# Altium schematic symbol library SMBJ14A-13-F.SchLib: 1 symbol
Pins are listed as number, name and electrical type; pins without a type are passive.

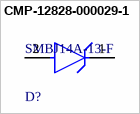
[diagram p0: symbol CMP-12828-000029-1]

## CMP-12828-000029-1
designator D?, comment SMBJ14A-13-F
TVS DIODE 14V 23.2V SMB; Max Surge Current: 25.8A; Power Dissipation: 600W; Reverse Breakdown Voltage: 15.6V; Max Breakdown Voltage: 17.9V; Direction: Unidirectional; Forward Voltage: 5V; Leakage Current: 5uA; Test Current: 1mA; Capacitance: 1nF; Number of Elements: 1; Element Configuration: Single; Clamping Voltage: 23.2V; Number of Pins: 2; Case/Package: SMB; Voltage Rating (DC): 14V; Radiation Hardening: No; Termination: SMD/SMT; Length: 4.57mm; Working Voltage: 14V; Max Operating Temperature: 150°C; Peak Pulse Current: 25.8A; Packaging: Tape and Reel; Max Output Current: 25.8A; Lead Free: Lead Free; Breakdown Voltage: 15.6V; Width: 3.9mm; Package Quantity: 1; Mount: Surface Mount; Min Breakdown Voltage: 15.6V; Max Power Dissipation: 600W; Peak Pulse Power: 600W; Height: 2.62mm; Max Reverse Leakage Current: 5uA; Polarity: Unidirectional; Min Operating Temperature: -55°C; Reverse Standoff Voltage: 14V
footprint FP-SMB-MFG
pins: 1 C, 2 A